# Altium footprint library AudioMoth 1.1.PCBLIB: 193 footprints (part 13 of 13)
Each footprint in its own frame and in the unit in brackets; x right, y up, seen from the top. Pads: shape width x height; smd on the part's side, far side on the other; paste and mask are expansions set on the pad; w line width, h text height; cw(c..) or ccw(c..) is an arc to the next point about the centre after c.
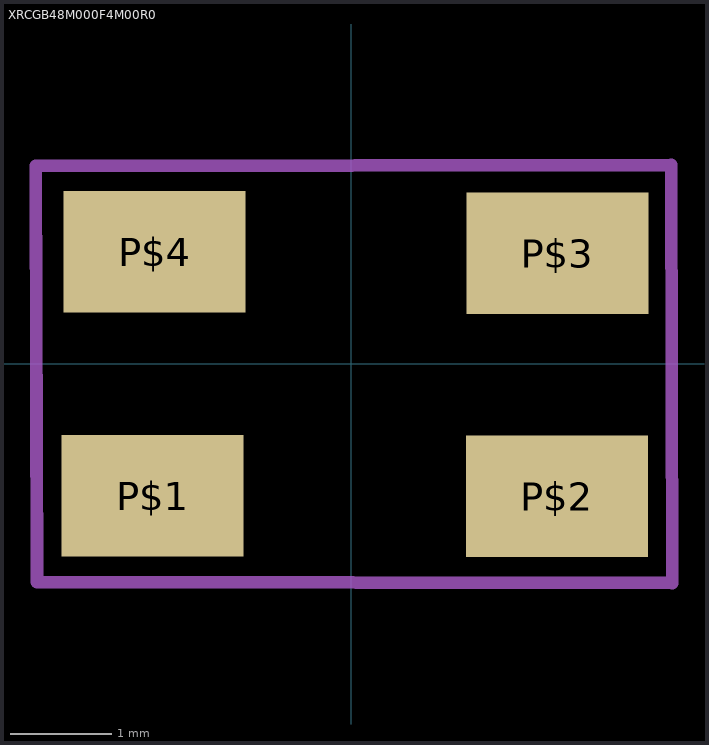
[diagram p12: the footprint, top view; thin cyan lines are the x and y axes]

## XRCGB48M000F4M00R0 [mil]
pads (4):
  rect 70.87x47.24 smd: P$1(-77.28,-51.42) P$2(80.12,-51.5) P$3(80.24,43.03) P$4(-76.48,43.58)
tPlace:
  lines w5: -122.76,77.05 124.57,77.44 124.96,-85.35 -122.36,-84.92 -122.76,77.05
  text "48MHz" at -133.31,86.81 h77.5